# Altium footprint library PcbLib1.PcbLib: 11 footprints
Each footprint in its own frame and in the unit in brackets; x right, y up, seen from the top. Pads: shape width x height; smd on the part's side, far side on the other; paste and mask are expansions set on the pad; w line width, h text height; cw(c..) or ccw(c..) is an arc to the next point about the centre after c.
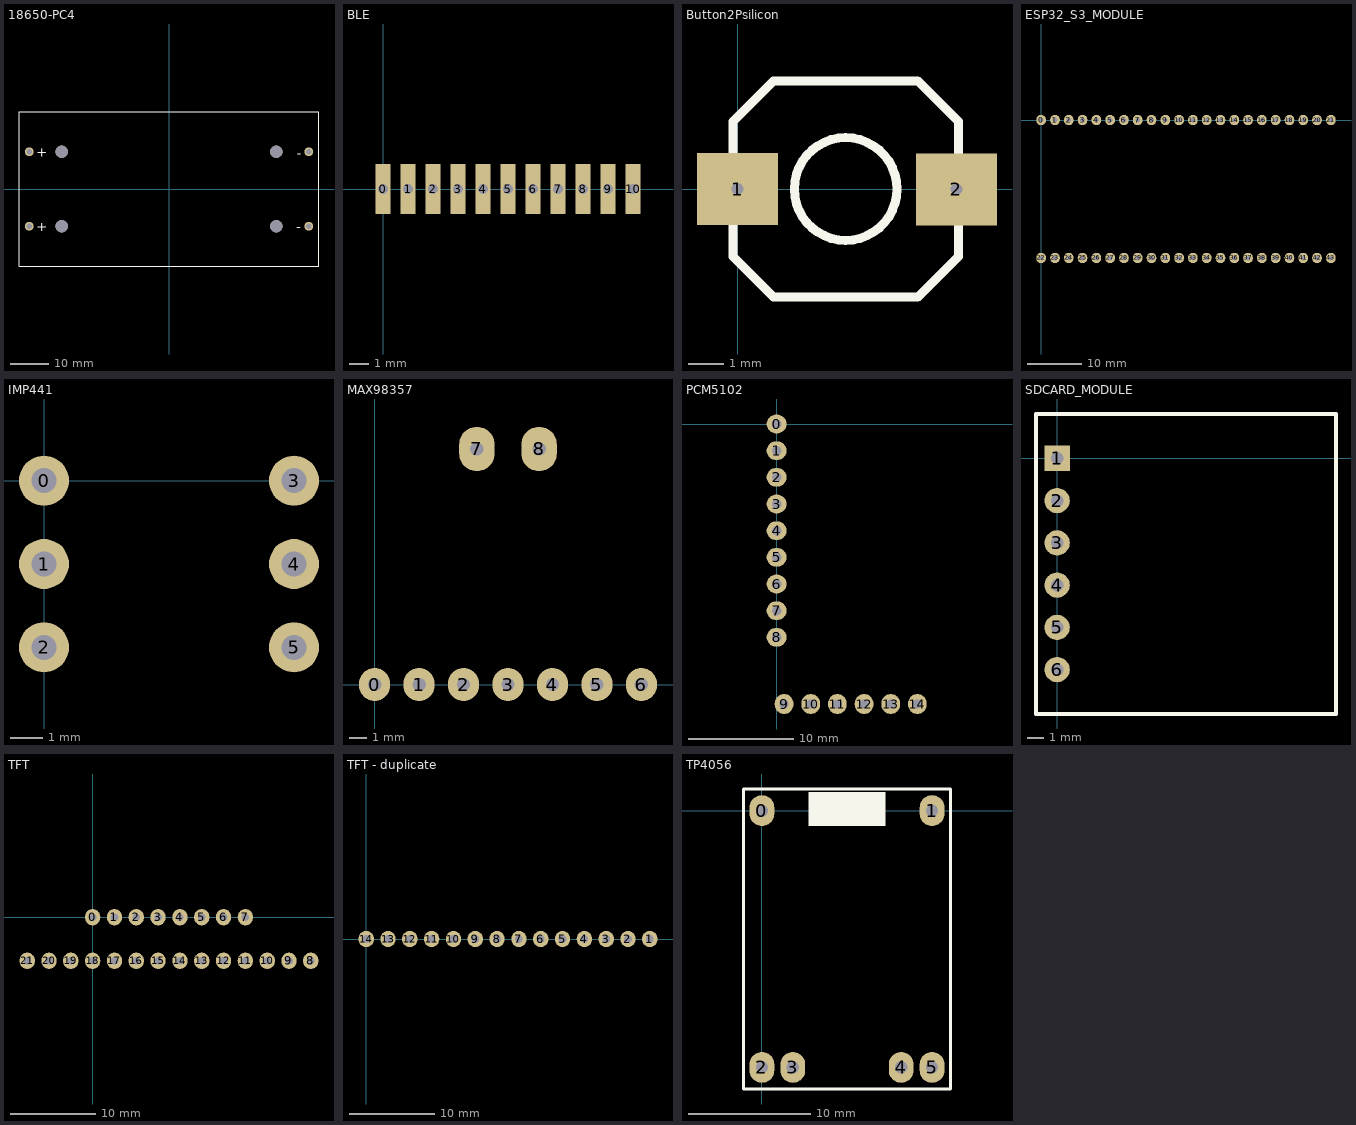
[diagram p0: the footprints below, top view; thin cyan lines are the x and y axes]

## 18650-PC4 [mil]
pads (8):
  round 90 hole 60: +1(-1425,380) +2(-1425,-380) -1(1425,380) -2(1425,-380)
  round 126 hole 126 unplated: ""(-1095,-380) ""(-1095,380) ""(1095,-380) ""(1095,380)
Top Overlay:
  lines w5: -1530,-790 -1530,790 1530,790 1530,-790 -1530,-790
  text "+" at -1351.76,330.43 h100.13
  text "+" at -1351.88,-430.6 h100.14
  text "-" at 1301.13,320.28 h100.09
  text "-" at 1300.12,-430.04 h100.01
3D body "step_temp.STEP": height 974.02, standoff 0, extent -1529.53,-791.54 1529.53,791.54

## BLE [mil]
pads (11):
  rect 30x100 hole 20: 0(0,0) 1(50,0) 2(100,0) 3(150,0) 4(200,0) 5(250,0) 6(300,0) 7(350,0) 8(400,0) 9(450,0) 10(500,0)
3D body "CX_ BT_ EMITTER JL6C8 REV2.step": height 116, standoff 0.24, extent -45,-29 545.55,874.54

## Button2Psilicon [mil]
pads (2):
  rect 90x80 hole 13: 1(0,0) 2(242.95,-0.37)
Top Overlay:
  circle w10: c120,0 r57.01
  lines w10: -5,-75 40,-120 200,-120 245,-75 245,75 200,120 40,120 -5,75 -5,45 -5,-75
3D body "Tactle Switch 6x6mm - Soft.stp": height 195, standoff -1.99, extent -3.75,-116.5 243.75,116.5

## ESP32_S3_MODULE [mil]
pads (44):
  oval 70x75 hole 35: 0(0,0) 1(100,0) 2(200,0) 3(300,0) 4(400,0) 5(500,0) 6(600,0) 7(700,0) 8(800,0) 9(900,0) 10(1000,0) 11(1100,0) 12(1200,0) 13(1300,0) 14(1400,0) 15(1500,0) 16(1600,0) 17(1700,0) 18(1800,0) 19(1900,0) 20(2000,0) 21(2100,0) 22(0,-1000) 23(100,-1000) 24(200,-1000) 25(300,-1000) 26(400,-1000) 27(500,-1000) 28(600,-1000) 29(700,-1000) 30(800,-1000) 31(900,-1000) 32(1000,-1000) 33(1100,-1000) 34(1200,-1000) 35(1300,-1000) 36(1400,-1000) 37(1500,-1000) 38(1600,-1000) 39(1700,-1000) 40(1800,-1000) 41(1900,-1000) 42(2000,-1000) 43(2100,-1000)
3D body "YD-ESP32-S3 v34.step": height 426.38, standoff -42.52, extent -100,-1050.2 2420.62,50.2

## IMP441 [mil]
pads (6):
  round 60 hole 30: 0(0,0) 1(0,-100) 2(0,-200) 3(300,0) 4(300,-100) 5(300,-200)
3D body "INMP441 I2S Microphone Module v15.step": height 411.34, standoff -31.57, extent -122,-382.31 419.96,178.31

## MAX98357 [mil]
pads (9):
  oval 70x75 hole 30: 0(0,0) 1(100,0) 2(200,0) 3(300,0) 4(400,0) 5(500,0) 6(600,0)
  oval 80x100 hole 30: 7(230,530) 8(370,530)
3D body "MAX98357A_3W_I2S_AMP v27.step": height 656.46, standoff -53.39, extent -54.33,-99.01 654.33,664.76

## PCM5102 [mil]
pads (15):
  oval 75x70 hole 35: 0(0,0) 1(0,-100) 2(0,-200) 3(0,-300) 4(0,-400) 5(0,-500) 6(0,-600) 7(0,-700) 8(0,-800)
  oval 70x75 hole 35: 9(28,-1050) 10(128,-1050) 11(228,-1050) 12(328,-1050) 13(428,-1050) 14(528,-1050)
3D body "PCM5102_Modul_ksu_detail.step": height 528.98, standoff -59.21, extent -65.98,-1111.97 685.98,140

## SDCARD_MODULE [mil]
pads (6):
  rect 60x60 hole 30: 1(0,0)
  round 60 hole 30: 2(0,-100) 3(0,-200) 4(0,-300) 5(0,-400) 6(0,-500)
Top Overlay:
  lines w10: -50,-605 660,-605 660,105 -50,105 -50,-605
3D body "MicroSD Card Module - 1.stp": height 132.93, standoff -1, extent -50.99,-606.5 761.01,106.5

## TFT [mil]
pads (22):
  oval 70x75 hole 35: 0(0,0) 1(100,0) 2(200,0) 3(300,0) 4(400,0) 5(500,0) 6(600,0) 7(700,0) 8(1000,-200) 9(900,-200) 10(800,-200) 11(700,-200) 12(600,-200) 13(500,-200) 14(400,-200) 15(300,-200) 16(200,-200) 17(100,-200) 18(0,-200) 19(-100,-200) 20(-200,-200) 21(-300,-200)
3D body "Header.SLDPRT": height 358.43, standoff -70.71, extent -50,-50 650,50
3D body "Header.SLDPRT": height 358.43, standoff -70.71, extent 50,-50 750,50
3D body "ER-TFTM1.54-1_3D.stp": height -222.76, standoff -376, extent -284.5,-1666 984.5,55

## TFT - duplicate [mil]
pads (14):
  oval 70x75 hole 35: 1(1300,0) 2(1200,0) 3(1100,0) 4(1000,0) 5(900,0) 6(800,0) 7(700,0) 8(600,0) 9(500,0) 10(400,0) 11(300,0) 12(200,0) 13(100,0) 14(0,0)
3D body "LCD_MSP2807_fusion.step": height 331.89, standoff -243.31, extent -335.43,-3310.82 1635.43,75

## TP4056 [mil]
pads (6):
  oval 80x100 hole 40: 0(0,0) 1(550,0) 2(0,-830) 3(100,-830) 4(450,-830) 5(550,-830)
Top Overlay:
  rectangle: 150,-50 400,60
  lines w10: -60,-900 -60,70 610,70 610,-900 -60,-900
3D body "TP4056_Charging_Module_Type_C (1).step": height 162.99, standoff 0, extent -65.52,-1044.08 619.52,109.46